# Altium schematic symbol library BC832.SchLib: 1 symbol
Pins are listed as number, name and electrical type; pins without a type are passive.

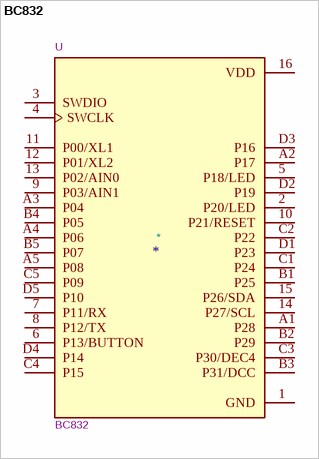
[diagram p0: symbol BC832]

## BC832
designator *  value BC832  Reference: U
Bluetooth module; MF: Fanstel Corp.; Description_1: Bluetooth Bluetooth v5.0 Transceiver Module 2.4GHz Integrated, Chip Surface Mount; Footprint: custom_foot:XCVR_BC832; Datasheet: https://mm.digikey.com/Volume0/opasdata/d220001/medias/docus/40/BC832_V2.01_Dec-2017.pdf; Description_: Bluetooth module; MAXIMUM_PACKAGE_HEIGHT: 1.3 mm; Package: Module Fanstel Corp.; Price: None; Check_prices: https://www.snapeda.com/parts/BC832/Fanstel/view-part/?ref=eda; STANDARD: Manufacturer Recommendations; PARTREV: 2.02; SnapEDA_Link: https://www.snapeda.com/parts/BC832/Fanstel/view-part/?ref=snap; MP: BC832; Purchase-URL: https://www.snapeda.com/api/url_track_click_mouser/?unipart_id=2754499&manufacturer=Fanstel Corp.&part_name=BC832&search_term=bc832; Availability: In Stock; MANUFACTURER: Fanstel Corp.
pins: 1 GND, 2 P20/LED, 3 SWDIO, 4 SWCLK, 5 P18/LED, 6 P13/BUTTON, 7 P11/RX, 8 P12/TX, 9 P03/AIN1, 10 P21/RESET, 11 P00/XL1, 12 P01/XL2, 13 P02/AIN0, 14 P27/SCL, 15 P26/SDA, 16 VDD, A1 P28, A2 P17, A3 P04, A4 P06, A5 P08, B1 P25, B2 P29, B3 P31/DCC, B4 P05, B5 P07, C1 P24, C2 P22, C3 P30/DEC4, C4 P15, C5 P09, D1 P23, D2 P19, D3 P16, D4 P14, D5 P10